# Altium footprint library PMR25HZPFV1L00.PcbLib: 3 footprints
Each footprint in its own frame and in the unit in brackets; x right, y up, seen from the top. Pads: shape width x height; smd on the part's side, far side on the other; paste and mask are expansions set on the pad; w line width, h text height; cw(c..) or ccw(c..) is an arc to the next point about the centre after c.
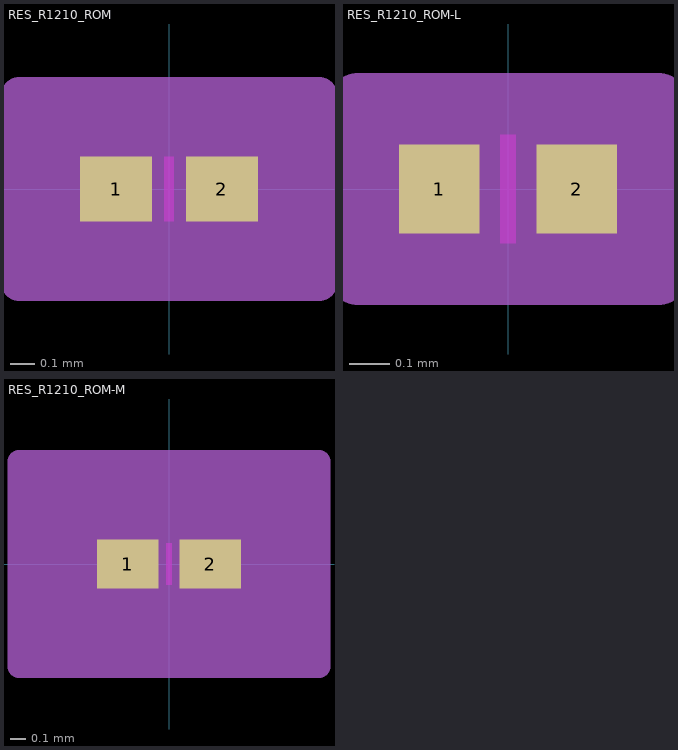
[diagram p0: the footprints below, top view; thin cyan lines are the x and y axes]

## RES_R1210_ROM [mm]
pads (2):
  rect 0.3x0.27 smd paste+0 mask+0: 1(-0.22,0) 2(0.22,0)
Top Layer keep-out:
  region: -0.019,-0.084 -0.019,0.084 0.019,0.084 0.019,-0.084
Top Overlay:
  text ".Designator" at -3.492,-0.635 h1.27
Keep-Out Layer:
  region: -0.019,-0.135 -0.019,0.135 0.019,0.135 0.019,-0.135
Mechanical 13:
  lines w0.025: -0.17,-0.135 -0.17,0.135 ; -0.17,-0.135 -0.07,-0.135 -0.07,0.135 -0.17,0.135 ; -0.17,-0.135 0.17,-0.135 ; -0.17,-0.135 -0.17,0.135 ; -0.17,0.135 0.17,0.135 ; 0.17,-0.135 0.07,-0.135 0.07,0.135 0.17,0.135 ; 0.17,-0.135 0.17,0.135 ; 0.17,-0.135 0.17,0.135
  text ".Designator" at -3.492,-0.635 h1.27
Mechanical 15:
  region: 0.624,-0.389 -0.624,-0.389 -0.624,0.389 0.624,0.389
  lines w0.152: -0.624,-0.389 -0.624,0.389 0.624,0.389 0.624,-0.389 -0.624,-0.389
3D body "RES_R1210_ROM.step": height 0.07, standoff 0, extent -0.17,-0.135 0.17,0.135

## RES_R1210_ROM-L [mm]
pads (2):
  rect 0.2x0.22 smd paste+0 mask+0: 1(-0.17,0) 2(0.17,0)
Top Layer keep-out:
  region: -0.019,-0.084 -0.019,0.084 0.019,0.084 0.019,-0.084
Top Overlay:
  text ".Designator" at -3.492,-0.635 h1.27
Keep-Out Layer:
  region: -0.019,-0.135 -0.019,0.135 0.019,0.135 0.019,-0.135
Mechanical 13:
  lines w0.025: -0.17,-0.135 -0.17,0.135 ; -0.17,-0.135 -0.07,-0.135 -0.07,0.135 -0.17,0.135 ; -0.17,-0.135 0.17,-0.135 ; -0.17,-0.135 -0.17,0.135 ; -0.17,0.135 0.17,0.135 ; 0.17,-0.135 0.07,-0.135 0.07,0.135 0.17,0.135 ; 0.17,-0.135 0.17,0.135 ; 0.17,-0.135 0.17,0.135
  text ".Designator" at -3.492,-0.635 h1.27
Mechanical 15:
  region: 0.372,-0.212 -0.372,-0.212 -0.372,0.212 0.372,0.212
  lines w0.152: -0.372,-0.212 -0.372,0.212 0.372,0.212 0.372,-0.212 -0.372,-0.212
3D body "RES_R1210_ROM.step": height 0.07, standoff 0, extent -0.17,-0.135 0.17,0.135

## RES_R1210_ROM-M [mm]
pads (2):
  rect 0.4x0.32 smd paste+0 mask+0: 1(-0.27,0) 2(0.27,0)
Top Layer keep-out:
  region: -0.019,-0.084 -0.019,0.084 0.019,0.084 0.019,-0.084
Top Overlay:
  text ".Designator" at -3.492,-0.635 h1.27
Keep-Out Layer:
  region: -0.019,-0.135 -0.019,0.135 0.019,0.135 0.019,-0.135
Mechanical 13:
  lines w0.025: -0.17,-0.135 -0.17,0.135 ; -0.17,-0.135 -0.07,-0.135 -0.07,0.135 -0.17,0.135 ; -0.17,-0.135 0.17,-0.135 ; -0.17,-0.135 -0.17,0.135 ; -0.17,0.135 0.17,0.135 ; 0.17,-0.135 0.07,-0.135 0.07,0.135 0.17,0.135 ; 0.17,-0.135 0.17,0.135 ; 0.17,-0.135 0.17,0.135
  text ".Designator" at -3.492,-0.635 h1.27
Mechanical 15:
  region: 0.978,-0.668 -0.978,-0.668 -0.978,0.668 0.978,0.668
  lines w0.152: -0.978,-0.668 -0.978,0.668 0.978,0.668 0.978,-0.668 -0.978,-0.668
3D body "RES_R1210_ROM.step": height 0.07, standoff 0, extent -0.17,-0.135 0.17,0.135